# EAGLE library part DB9 (library DB9)
Check availability <https://pricing.snapeda.com/parts/DB-9/Amphenol/view-part?ref=eda>
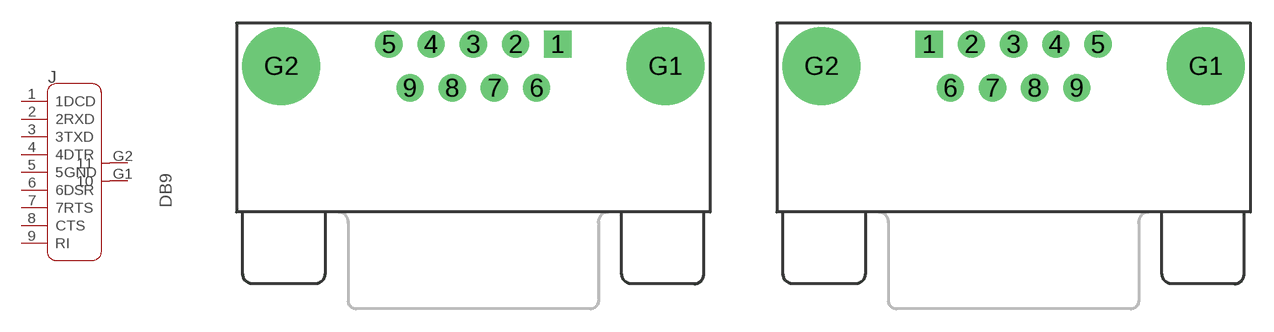
[diagram p0: symbol with the pads of DB9; footprints DB9, DB9-MEAL]

Designator prefix J

## DB9'FEMAL' (AVAILABILITY: In Stock; CHECK_PRICES: https://www.snapeda.com/parts/DB-9/Amphenol/view-part/?ref=eda; DESCRIPTION: Cable Grip 0.38 ~ 0.50 (9.5mm ~ 12.7mm) Aluminum - Silver; MF: Amphenol; MP: DB-9; PACKAGE: None; PRICE: None; SNAPEDA_LINK: https://www.snapeda.com/parts/DB-9/Amphenol/view-part/?ref=snap)  [DB9]
1  1DCD
2  2RXD
3  3TXD
4  4DTR
5  5GND
6  6DSR
7  7RTS
8  CTS
9  RI
G1  10
G2  11

## DB9'MEAL' (AVAILABILITY: In Stock; CHECK_PRICES: https://www.snapeda.com/parts/DB-9/Amphenol/view-part/?ref=eda; DESCRIPTION: Cable Grip 0.38 ~ 0.50 (9.5mm ~ 12.7mm) Aluminum - Silver; MF: Amphenol; MP: DB-9; PACKAGE: None; PRICE: None; SNAPEDA_LINK: https://www.snapeda.com/parts/DB-9/Amphenol/view-part/?ref=snap)  [DB9-MEAL]
Pads as for DB9

## Footprint DB9 (pad centres in mm)
SUB-D
drill 1.143 pad 1.778 square: 1 5.486,1.422
drill 1.143 pad 1.778: 2 2.743,1.422; 3 0,1.422; 4 -2.743,1.422; 5 -5.486,1.422; 6 4.115,-1.422; 7 1.372,-1.422; 8 -1.372,-1.422; 9 -4.115,-1.422
drill 3.302 pad 5.08: G1 12.497,0; G2 -12.497,0

## Footprint DB9-MEAL (pad centres in mm)
drill 1.143 pad 1.778 square: 1 -5.486,1.422
drill 1.143 pad 1.778: 2 -2.743,1.422; 3 0,1.422; 4 2.743,1.422; 5 5.486,1.422; 6 -4.115,-1.422; 7 -1.372,-1.422; 8 1.372,-1.422; 9 4.115,-1.422
drill 3.302 pad 5.08: G1 12.497,0; G2 -12.497,0